# Altium schematic symbol library connectors.SchLib: 2 symbols
Pins are listed as number, name and electrical type; pins without a type are passive.

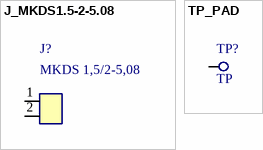
[diagram p0: symbols J_MKDS1.5-2-5.08 to TP_PAD]

## J_MKDS1.5-2-5.08
designator J?, comment MKDS 1,5/2-5,08
Screw terminal 2-pos 5.08 mm, 17.5 A, 250 V; Manufacturer: Phoenix Contact; MPN: 1715721; Value: MKDS 1,5/2-5,08; LCSC: C480516; JLCPCB Type: Extended (hand-soldered, not in SMT order); Datasheet: 1715721_C480516.pdf
footprint TB_MKDS1.5-2-5.08
pins: 1, 2

## TP_PAD
designator TP?, comment TP
Test pad 1.5 mm; Value: TP; Manufacturer: -; MPN: -; LCSC: -; JLCPCB Type: - (copper pad, no part); Datasheet: -
footprint TP_PAD_D1.5
pins: 1